# Altium footprint library custom-case.PcbLib: 342 footprints (part 16 of 22)
Each footprint in its own frame and in the unit in brackets; x right, y up, seen from the top. Pads: shape width x height; smd on the part's side, far side on the other; paste and mask are expansions set on the pad; w line width, h text height; cw(c..) or ccw(c..) is an arc to the next point about the centre after c.
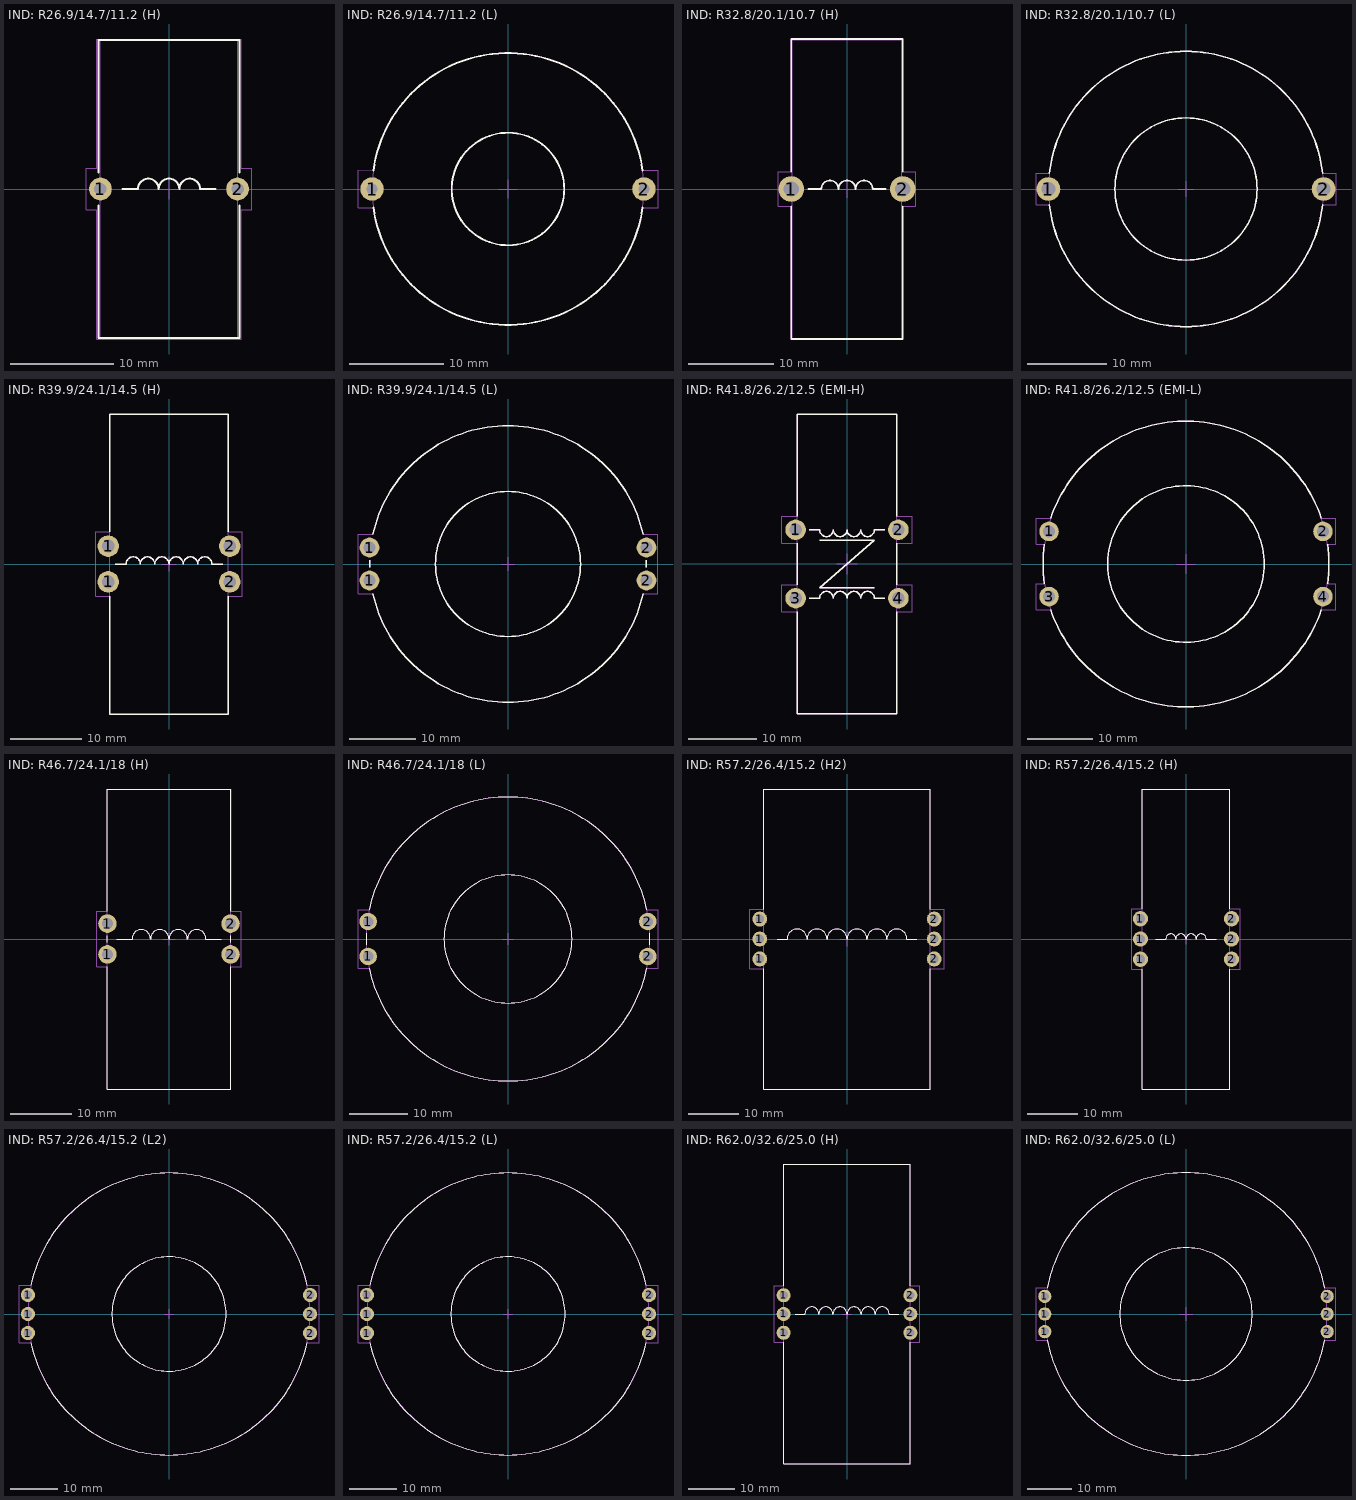
[diagram p15: the footprints below, top view; thin cyan lines are the x and y axes]

## IND: R26.9/14.7/11.2 (H) [mm]
pads (2):
  round 2.2 hole 1.2: 1(-6.626,0) 2(6.626,0)
Top Overlay:
  lines w0.2: -6.8,-1.6 -6.8,-14.4 6.8,-14.4 6.8,-1.6 ; -6.8,1.6 -6.8,14.4 6.8,14.4 6.8,1.6 ; -4.5,0 -3,0 cw(c-2,0) -1,0 cw(c0,0) 1,0 cw(c2,0) 3,0 4.5,0
Top Assy:
  lines w0.1: -4.5,0 -3,0 cw(c-2,0) -1,0 cw(c0,0) 1,0 cw(c2,0) 3,0 4.5,0 ; -6.626,-14.476 6.626,-14.476 6.626,14.476 -6.626,14.476 -6.626,-14.476
Size Area:
  lines w0.1: -1,0 1,0 ; 0,-1 0,1 ; -8,-2 -7,-2 -7,-14.5 7,-14.5 7,-2 8,-2 8,1.5 8,2 7,2 7,14.5 -7,14.5 -7,2 -8,2 -8,-2
3D body "F2 R 26.9 x 14.7 x 11.2 v1.step": height 28.98, standoff 0.02, extent -6.626,-14.476 6.626,14.476

## IND: R26.9/14.7/11.2 (L) [mm]
pads (2):
  round 2.5 hole 1.2: 1(-14.5,0) 2(14.5,0)
Top Overlay:
  circle w0.2: c0,0 r6
  lines w0.2: -14.364,-1.981 ccw(c0,0) 14.364,-1.981 ; -14.364,1.981 cw(c0,0) 14.364,1.981
Top Assy:
  circle w0.1: c0,0 r6
  circle w0.1: c0,0 r14.5
Size Area:
  lines w0.1: -14.361,2.051 -16,2 -16,-2 -14.361,-2.001 ccw(c0,0) 14.361,-2 16,-2 16,1.998 14.362,1.998 ccw(c0,0) -14.354,2.051 ; -1,0 1,0 ; 0,-1 0,1
3D body "F2 R 26.9 x 14.7 x 11.2 v1.step": height 13.33, standoff 0.07, extent -14.5,-14.476 14.452,14.476

## IND: R32.8/20.1/10.7 (H) [mm]
pads (2):
  round 3 hole 1.8: 1(-6.5,0) 2(6.5,0)
Top Overlay:
  lines w0.2: -6.5,-2 -6.5,-17.5 6.5,-17.5 6.5,-2 ; -6.5,2 -6.5,17.5 6.5,17.5 6.5,2 ; -4.5,0 -3,0 cw(c-2,0) -1,0 cw(c0,0) 1,0 cw(c2,0) 3,0 4.5,0
Top Assy:
  lines w0.1: -4.5,0 -3,0 cw(c-2,0) -1,0 cw(c0,0) 1,0 cw(c2,0) 3,0 4.5,0 ; -6.376,-17.426 6.376,-17.426 6.376,17.426 -6.376,17.426 -6.376,-17.426
Size Area:
  lines w0.1: -1,0 1,0 ; 0,-1 0,1 ; -8,-2 -8,2 -6.5,2 -6.5,17.5 6.5,17.5 6.5,2 8,2 8,-2 6.5,-2 6.5,-17.5 -6.5,-17.5 -6.5,-2 -8,-2
3D body "F3 R 32.8 x 20.1 x 10.7 v1.step": height 34.9, standoff 0.1, extent -6.376,-17.426 6.376,17.426

## IND: R32.8/20.1/10.7 (L) [mm]
pads (2):
  round 3 hole 1.8: 1(-17.427,0) 2(17.425,0)
Top Overlay:
  circle w0.2: c0,0 r9
  lines w0.2: -17.313,-1.987 ccw(c0,0) 17.313,-1.987 ; -17.313,1.987 cw(c0,0) 17.313,1.987
Top Assy:
  circle w0.1: c0,0 r9
  circle w0.1: c0,0 r17.427
Size Area:
  lines w0.1: -1,0 1,0 ; 0,-1 0,1 ; -19,-2 -19,2 -17.312,2 cw(c0,0) 17.316,1.966 19,1.966 19,-2 17.316,-1.966 cw(c0,0) -17.312,-2 -19,-2
3D body "F3 R 32.8 x 20.1 x 10.7 v1.step": height 12.84, standoff 0.08, extent -17.427,-17.396 17.425,17.396

## IND: R39.9/24.1/14.5 (H) [mm]
pads (4):
  round 3 hole 1.8: 1(-8.5,-2.5) 1(-8.5,2.5) 2(8.5,-2.5) 2(8.5,2.5)
Top Overlay:
  lines w0.2: -8.276,-4.5 -8.276,-20.976 8.276,-20.976 8.276,-4.5 ; -8.276,4.5 -8.276,20.976 8.276,20.976 8.276,4.5 ; -7.5,0 -6,0 cw(c-5,0) -4,0 cw(c-3,0) -2,0 cw(c-1,0) 0,0 cw(c1,0) 2,0 cw(c3,0) 4,0 cw(c5,0) 6,0 7.5,0
Top Assy:
  lines w0.1: -7.5,0 -6,0 cw(c-5,0) -4,0 cw(c-3,0) -2,0 cw(c-1,0) 0,0 cw(c1,0) 2,0 cw(c3,0) 4,0 cw(c5,0) 6,0 7.5,0 ; -8.276,-20.976 -8.276,20.976 8.276,20.976 8.276,-20.976 -8.276,-20.976
Size Area:
  lines w0.1: -1,0 1,0 ; 0,-1 0,1 ; -10.25,-4.5 -10.25,4.5 -8.276,4.5 -8.276,20.976 8.276,20.976 8.276,4.5 10.25,4.5 10.25,-4.5 8.276,-4.5 8.276,-20.976 -8.276,-20.976 -8.276,-4.5 -10.25,-4.5
3D body "F4 R 39.9 x 24.1 x 14.5 v1.step": height 41.98, standoff 0.02, extent -8.276,-20.976 8.276,20.976

## IND: R39.9/24.1/14.5 (L) [mm]
pads (4):
  round 3 hole 1.8: 1(-21,-2.5) 1(-21,2.5) 2(21,-2.5) 2(21,2.5)
Top Overlay:
  circle w0.2: c0,0 r11
  lines w0.2: -20.97,-0.498 cw(c0,0) -20.969,0.549 ; -20.488,-4.497 ccw(c0,0) 20.488,-4.497 ; -20.488,4.497 cw(c0,0) 20.488,4.497 ; 20.969,0.549 cw(c0,0) 20.97,-0.498
Top Assy:
  circle w0.1: c0,0 r11
  lines w0.1: -20.97,-0.498 cw(c0,0) -20.969,0.549 ; -20.488,-4.497 ccw(c0,0) 20.488,-4.497 ; -20.488,4.497 cw(c0,0) 20.488,4.497 ; 20.969,0.549 cw(c0,0) 20.97,-0.498
Size Area:
  lines w0.1: -1,0 1,0 ; 0,-1 0,1 ; 20.488,4.497 ccw(c0,0) -20.488,4.497 -22.75,4.497 -22.75,-4.497 -20.488,-4.497 ccw(c0,0) 20.488,-4.497 22.75,-4.497 22.75,4.497 20.5,4.497
3D body "F4 R 39.9 x 24.1 x 14.5 v1.step": height 16.53, standoff -0.03, extent -20.976,-20.976 20.976,20.976

## IND: R41.8/26.2/12.5 (EMI-H) [mm]
pads (4):
  round 3 hole 1.8: 1(-7.5,5) 2(7.5,5) 3(-7.5,-5) 4(7.5,-5)
Top Overlay:
  lines w0.2: -7.256,-7 -7.256,-21.906 7.256,-21.906 7.256,-7 ; -7.256,-3 -7.256,3 ; -7.256,7 -7.256,21.906 7.256,21.906 7.256,7 ; -5.5,-5 -4,-5 cw(c-3,-5) -2,-5 cw(c-1,-5) 0,-5 cw(c1,-5) 2,-5 cw(c3,-5) 4,-5 5.5,-5 ; -5.5,5 -4,5 ccw(c-3,5) -2,5 ccw(c-1,5) 0,5 ccw(c1,5) 2,5 ccw(c3,5) 4,5 5.5,5 ; -4,3.5 4,3.5 -4,-3.5 4,-3.5 ; 7.256,-3 7.256,3
Top Assy:
  lines w0.1: -5.5,-5 -4,-5 cw(c-3,-5) -2,-5 cw(c-1,-5) 0,-5 cw(c1,-5) 2,-5 cw(c3,-5) 4,-5 5.5,-5 ; -5.5,5 -4,5 ccw(c-3,5) -2,5 ccw(c-1,5) 0,5 ccw(c1,5) 2,5 ccw(c3,5) 4,5 5.5,5 ; -4,3.5 4,3.5 -4,-3.5 4,-3.5 ; -7.256,-21.906 7.256,-21.906 7.256,21.906 -7.256,21.906 -7.256,-21.906
Size Area:
  lines w0.1: -1.5,0 1.5,0 ; 0,-1.5 0,1.5 ; -9.5,-7 -7.256,-7 -7.256,-21.906 7.256,-21.906 7.256,-7 9.5,-7 9.5,-3 7.256,-3 7.256,3 9.5,3 9.5,7 7.256,7 7.256,21.906 -7.256,21.906 -7.256,7 -9.5,7 -9.5,3 -7.256,3 -7.256,-3 -9.5,-3 -9.5,-7
3D body "R 41.8 x 26.2 x 12.5Blue.step": height 41.9, standoff 0.1, extent -7.256,-21.906 7.256,21.906

## IND: R41.8/26.2/12.5 (EMI-L) [mm]
pads (4):
  round 3 hole 1.8: 1(-21,5) 2(21,5) 3(-21,-5) 4(21,-5)
Top Overlay:
  circle w0.2: c0,0 r12
  lines w0.2: -21.7,3 ccw(c0,0) -21.698,-3.014 ; -20.762,-6.987 ccw(c0,0) 20.751,-7.017 ; -20.762,6.987 cw(c0,0) 20.751,7.017 ; 21.698,-3.014 ccw(c0,0) 21.7,3
Top Assy:
  circle w0.1: c0,0 r12
  circle w0.1: c0,0 r21.9
Size Area:
  lines w0.1: -1.5,0 1.5,0 ; 0,-1.5 0,1.5 ; -23,-7 -20.762,-6.987 ccw(c0,0) 20.751,-7.017 23,-7.017 23,-3.014 21.698,-3.014 ccw(c0,0) 21.7,3 23,3 23,7 20.751,7.017 ccw(c0,0) -20.762,6.987 -23,7 -23,3 -21.7,3 ccw(c0,0) -21.698,-3.014 -23,-3.014 -23,-7
3D body "R 41.8 x 26.2 x 12.5Blue.step": height 14.64, standoff 0.13, extent -20.9,-21.906 20.9,21.906

## IND: R46.7/24.1/18 (H) [mm]
pads (4):
  round 3 hole 1.8: 1(-10,-2.5) 1(-10,2.5) 2(10,-2.5) 2(10,2.5)
Top Overlay:
  lines w0.2: -10.026,-4.5 -10.026,-24.363 10.026,-24.363 10.026,-4.5 ; -10.026,-0.5 -10,0.5 ; -10.026,4.5 -10.026,24.363 10.026,24.363 10.026,5 10.026,4.5 ; -8.5,0 -6,0 cw(c-4.5,0) -3,0 cw(c-1.5,0) 0,0 cw(c1.5,0) 3,0 cw(c4.5,0) 6,0 8.5,0 ; 10,-0.5 10.026,0.5
Top Assy:
  lines w0.1: -8.5,0 -6,0 cw(c-4.5,0) -3,0 cw(c-1.5,0) 0,0 cw(c1.5,0) 3,0 cw(c4.5,0) 6,0 8.5,0 ; -10.026,-24.363 -10.026,24.363 10.026,24.363 10.026,-24.363 -10.026,-24.363
Size Area:
  lines w0.1: -1,0 1,0 ; 0,-1 0,1 ; -11.75,-4.5 -10,-4.5 -10,-24.363 10,-24.363 10.026,-4.5 11.75,-4.5 11.75,4.5 10.026,4.5 10,24.363 -10,24.363 -10,4.5 -11.75,4.5 -11.75,-4.5
3D body "F5 R 46.7 x 24.1 x 18 v1.step": height 48.57, standoff -0.17, extent -10.026,-24.363 10.026,24.363

## IND: R46.7/24.1/18 (L) [mm]
pads (4):
  round 3 hole 1.8: 1(-24,-3) 1(-24,3) 2(24,-3) 2(24,3)
Top Overlay:
  circle w0.2: c0,0 r11
  lines w0.2: -24.35,-1 cw(c0,0) -24.349,1.015 ; -23.854,-4.99 ccw(c0,0) 23.854,-4.99 ; -23.854,4.99 cw(c0,0) 23.854,4.99 ; 24.35,-1 ccw(c0,0) 24.349,1.015
Top Assy:
  circle w0.1: c0,0 r11
  circle w0.1: c0,0 r24.371
Size Area:
  lines w0.1: -1,0 1,0 ; 0,-1 0,1 ; -25.75,-5.001 -23.854,-4.99 ccw(c0,0) 23.854,-4.99 25.75,-5.001 25.75,4.99 23.854,4.99 ccw(c0,0) -23.854,4.99 -25.75,4.99 -25.75,-5.001
3D body "F5 R 46.7 x 24.1 x 18 v1.step": height 20.03, standoff -0.03, extent -24.37,-24.363 24.37,24.363

## IND: R57.2/26.4/15.2 (H2) [mm]
pads (6):
  round 3 hole 1.8: 1(-17.5,-4) 1(-17.5,0) 1(-17.5,4) 2(17.5,-4) 2(17.5,0) 2(17.5,4)
Top Overlay:
  lines w0.2: -16.722,-6 -16.722,-30.09 16.722,-30.09 16.722,-6 ; -16.722,6 -16.722,30.09 16.722,30.09 16.722,6 ; -14,0 -12,0 cw(c-10,0) -8,0 cw(c-6,0) -4,0 cw(c-2,0) 0,0 cw(c2,0) 4,0 cw(c6,0) 8,0 cw(c10,0) 12,0 14,0
Top Assy:
  lines w0.1: -14,0 -12,0 cw(c-10,0) -8,0 cw(c-6,0) -4,0 cw(c-2,0) 0,0 cw(c2,0) 4,0 cw(c6,0) 8,0 cw(c10,0) 12,0 14,0 ; -16.722,-30.09 16.722,-30.09 16.722,30.09 -16.722,30.09 -16.722,-30.09
Size Area:
  lines w0.1: -1.5,0 1.5,0 ; 0,-1.5 0,1.5 ; -19.5,-6 -19.5,6 -16.722,6 -16.722,30.09 16.722,30.09 16.722,6 19.5,6 19.5,-6 16.722,-6 16.722,-30.09 -16.722,-30.09 -16.722,-6 -19.5,-6
3D body "F6 R 57.2 x 26.4 x 15.2 v2.step": height 60.11, standoff -0.11, extent -16.722,-30.09 16.722,30.09

## IND: R57.2/26.4/15.2 (H) [mm]
pads (6):
  round 3 hole 1.8: 1(-9,-4) 1(-9,0) 1(-9,4) 2(9,-4) 2(9,0) 2(9,4)
Top Overlay:
  region: 3.5,-26.5
  lines w0.2: -8.626,-6 -8.626,-29.614 8.626,-29.614 8.626,-6 ; -8.626,6 -8.626,29.614 8.626,29.614 8.626,6 ; -6,0 -4,0 cw(c-3,0) -2,0 cw(c-1,0) 0,0 cw(c1,0) 2,0 cw(c3,0) 4,0 6,0
Top Assy:
  region: 3.5,-26.5
  lines w0.1: -6,0 -4,0 cw(c-3,0) -2,0 cw(c-1,0) 0,0 cw(c1,0) 2,0 cw(c3,0) 4,0 6,0 ; -8.626,-29.614 8.626,-29.614 8.626,29.614 -8.626,29.614 -8.626,-29.614
Size Area:
  lines w0.1: -1,0 1,0 ; 0,-1 0,1 ; -10.75,-6 -8.626,-6 -8.626,-29.614 8.626,-29.614 8.626,-6 10.75,-6 10.75,6 8.626,6 8.626,29.614 -8.626,29.614 -8.626,6 -10.75,6 -10.75,-6
3D body "F6 R 57.2 x 26.4 x 15.2 v1.step": height 58.92, standoff -0.32, extent -8.626,-29.614 8.626,29.614

## IND: R57.2/26.4/15.2 (L2) [mm]
pads (6):
  round 3 hole 1.8: 1(-29.621,-4) 1(-29.621,0) 1(-29.621,4) 2(29.621,-4) 2(29.621,0) 2(29.621,4)
Top Overlay:
  circle w0.2: c0,0 r12
  lines w0.2: -29,-6 ccw(c0,0) 29,-6 ; -29,6 cw(c0,0) 29,6
Top Assy:
  circle w0.1: c0,0 r12
  circle w0.1: c0,0 r29.621
Size Area:
  lines w0.1: -1,0 1,0 ; 0,-1 0,1 ; -31.5,-6 -31.5,6 -29,6 cw(c0,0) 29,6 31.5,6 31.5,-6 29,-6 cw(c0,0) -29,-6 -31.5,-6
3D body "F6 R 57.2 x 26.4 x 15.2 v2.step": height 33.52, standoff 0.08, extent -30.108,-30.09 30.108,30.09

## IND: R57.2/26.4/15.2 (L) [mm]
pads (6):
  round 3 hole 1.8: 1(-29.621,-4) 1(-29.621,0) 1(-29.621,4) 2(29.621,-4) 2(29.621,0) 2(29.621,4)
Top Overlay:
  circle w0.2: c0,0 r12
  lines w0.2: -29,-6 ccw(c0,0) 29,-6 ; -29,6 cw(c0,0) 29,6
Top Assy:
  circle w0.1: c0,0 r12
  circle w0.1: c0,0 r29.621
Size Area:
  lines w0.1: -1,0 1,0 ; 0,-1 0,1 ; -31.5,-6 -31.5,6 -29,6 cw(c0,0) 29,6 31.5,6 31.5,-6 29,-6 cw(c0,0) -29,-6 -31.5,-6
3D body "F6 R 57.2 x 26.4 x 15.2 v1.step": height 17.23, standoff -0.03, extent -29.621,-29.614 29.621,29.614

## IND: R62.0/32.6/25.0 (H) [mm]
pads (6):
  round 3 hole 1.8: 1(-13.526,-4) 1(-13.526,0) 1(-13.526,4) 2(13.526,-4) 2(13.526,0) 2(13.526,4)
Top Overlay:
  lines w0.2: -13.526,-6 -13.526,-32 13.526,-32 13.526,-6 ; -13.526,6 -13.5,32.016 13.526,32 13.526,6 ; -11,0 -9,0 cw(c-7.5,0) -6,0 cw(c-4.5,0) -3,0 cw(c-1.5,0) 0,0 cw(c1.5,0) 3,0 cw(c4.5,0) 6,0 cw(c7.5,0) 9,0 11,0
Top Assy:
  lines w0.1: -11,0 -9,0 cw(c-7.5,0) -6,0 cw(c-4.5,0) -3,0 cw(c-1.5,0) 0,0 cw(c1.5,0) 3,0 cw(c4.5,0) 6,0 cw(c7.5,0) 9,0 11,0 ; -13.526,-32.016 -13.526,32.016 13.526,32.016 13.526,-32.016 -13.526,-32.016
Size Area:
  lines w0.1: -1,0 1,0 ; 0,-1 0,1 ; -15.5,-6 -15.5,6 -13.526,6 -13.5,32.016 13.526,32.016 13.526,6 15.5,6 15.5,-6 13.526,-6 13.526,-32.016 -13.526,-32 -13.526,-6 -15.5,-6
3D body "F7 R 62.0 x 32.6 x 25.0 v1.step": height 64.02, standoff -0.02, extent -13.526,-32.016 13.526,32.016

## IND: R62.0/32.6/25.0 (L) [mm]
pads (6):
  round 3 hole 1.8: 1(-32,-4) 1(-32,0) 1(-32,4) 2(32,-4) 2(32,0) 2(32,4)
Top Overlay:
  circle w0.2: c0,0 r15
  lines w0.2: -31.435,-5.988 ccw(c0,0) 31.435,-5.988 ; -31.435,5.988 cw(c0,0) 31.435,5.988
Top Assy:
  circle w0.1: c0,0 r32
  circle w0.1: c0,0 r15
Size Area:
  lines w0.1: -1.5,0 1.5,0 ; 0,-1.5 0,1.5 ; -34,-6 -34,5.988 -31.435,5.988 cw(c0,0) 31.435,5.988 34,5.988 34,-6 31.435,-5.988 cw(c0,0) -31.435,-5.988 -34,-6
3D body "F7 R 62.0 x 32.6 x 25.0 v1.step": height 27.03, standoff -0.03, extent -32.022,-32.016 32.022,32.016